# Altium schematic symbol library Gateway_Academic.SchLib: 67 symbols (part 2 of 2)
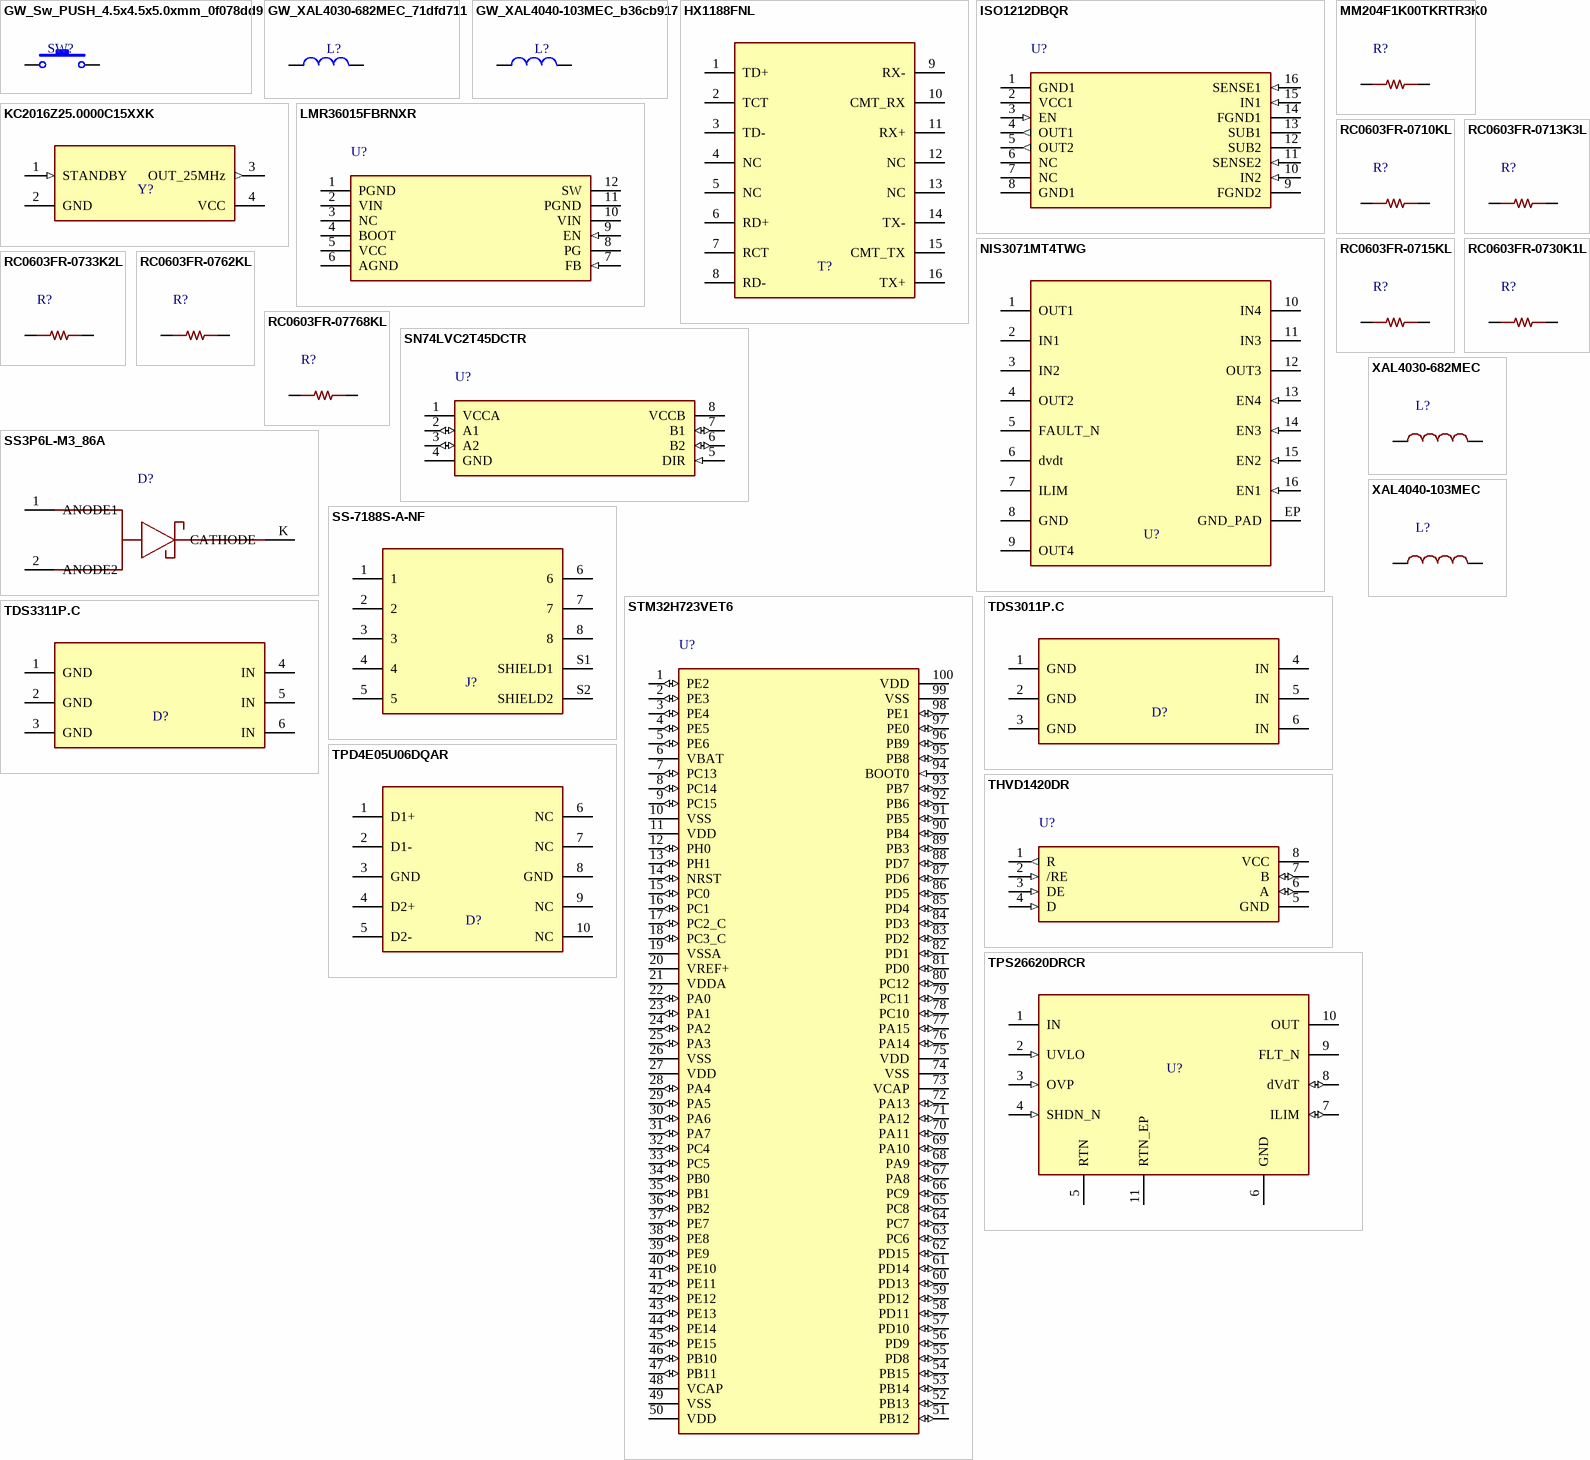
[diagram p2: symbols GW_Sw_PUSH_4.5x4.5x5.0xmm_0f078dd9 to XAL4040-103MEC]

## TPS26620DRCR
designator U?
Single-channel60V eFuse; TPS26620 latch-off; RTN != system GND; DRC10+EP11; Manufacturer: Texas Instruments; Manufacturer Part Number: TPS26620DRCR; Local Datasheet: sources/tps26620/tps2662.pdf; CAD Status: CAD_CANDIDATE; Design Approval: APPROVED_COMPONENT_SELECTION; Electrical Test: NOT_TESTED; Critical Connection: Pin5 and EP11 to EF_RTN, NEVER directly to system GND pin6; Fault Response: TPS26620 latch-off, adjustable overvoltage cutoff; not TPS26621 auto-retry; Datasheet: https://www.ti.com/lit/ds/symlink/tps2662.pdf; Source: TI TPS2662 SLVSDT4F Dec2021 Table6-1 p4; DRC0010J4218878/B board p44/stencil p45; Footprint Limitation: Native custom-pad11 extension conversion/net inheritance pending; not PCB-release ready
footprint GW_DRC0010J_TI_TPS2662
pins: 1 IN (power), 2 UVLO (in), 3 OVP (in), 4 SHDN_N (in), 5 RTN (power), 6 GND (power), 7 ILIM (io), 8 dVdT (io), 9 FLT_N (oc), 10 OUT (power), 11 RTN_EP (power)

## XAL4030-682MEC
designator L?
Coilcraft document806-4 revised02/25/26 Recommended Land Pattern; Nonpolar winding; pin1=marked high-dv/dt end by project convention. Full load/hot Isat and loss qualification pending.; Manufacturer Part Number: XAL4030-682MEC; CAD Status: CAD_CANDIDATE; Manufacturer: Coilcraft; Source: Coilcraft document806-4 revised02/25/26 Recommended Land Pattern; Limitations: Nonpolar winding; pin1=marked high-dv/dt end by project convention. Full load/hot Isat and loss qualification pending.
footprint GW_XAL4030_COILCRAFT
pins: 1, 2

## XAL4040-103MEC
designator L?
Coilcraft document806-4 revised02/25/26 Recommended Land Pattern; Nonpolar winding; pin1=marked high-dv/dt end by project convention. Full load/hot Isat and loss qualification pending.; Manufacturer Part Number: XAL4040-103MEC; CAD Status: CAD_CANDIDATE; Manufacturer: Coilcraft; Source: Coilcraft document806-4 revised02/25/26 Recommended Land Pattern; Limitations: Nonpolar winding; pin1=marked high-dv/dt end by project convention. Full load/hot Isat and loss qualification pending.
footprint GW_XAL4040_COILCRAFT
pins: 1, 2